# EAGLE library part BQ24040DSQR (library BQ24040DSQR)
1A Single-Input, Single Cell Li-Ion Battery Charger. Vovp=6.6V | Linear Source: Datasheet <http://www.ti.com/lit/gpn/bq24040>
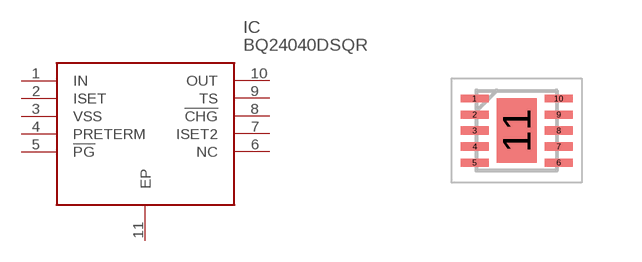
[diagram p0: symbol with the pads of SON40P200X200X80-11N; footprint SON40P200X200X80-11N]

Designator prefix IC

## BQ24040DSQR (Description: 1A Single-Input, Single Cell Li-Ion Battery Charger. Vovp=6.6V | Linear; Height: 0.8mm; Manufacturer_Name: Texas Instruments; Manufacturer_Part_Number: BQ24040DSQR; Mouser_Part_Number: 595-BQ24040DSQR; Mouser_Price-Stock: https://www.mouser.co.uk/ProductDetail/Texas-Instruments/BQ24040DSQR?qs=c7TMWs5treTJYvOlVMq%252B%2Fw%3D%3D)  [SON40P200X200X80-11N]
1  IN
2  ISET
3  VSS
4  PRETERM
5  !PG
6  NC  nc
7  ISET2
8  !CHG
9  TS
10  OUT
11  EP

## Footprint SON40P200X200X80-11N (pad centres in mm)
WSON dsq
smd 0.7 x 0.2: 1 -1.05,0.8; 2 -1.05,0.4; 3 -1.05,0; 4 -1.05,-0.4; 5 -1.05,-0.8; 6 1.05,-0.8; 7 1.05,-0.4; 8 1.05,0; 9 1.05,0.4; 10 1.05,0.8
smd 1 x 1.6: 11 0,0